# Altium footprint library RXM-433-LR.PcbLib: 1 footprints
Each footprint in its own frame and in the unit in brackets; x right, y up, seen from the top. Pads: shape width x height; smd on the part's side, far side on the other; paste and mask are expansions set on the pad; w line width, h text height; cw(c..) or ccw(c..) is an arc to the next point about the centre after c.
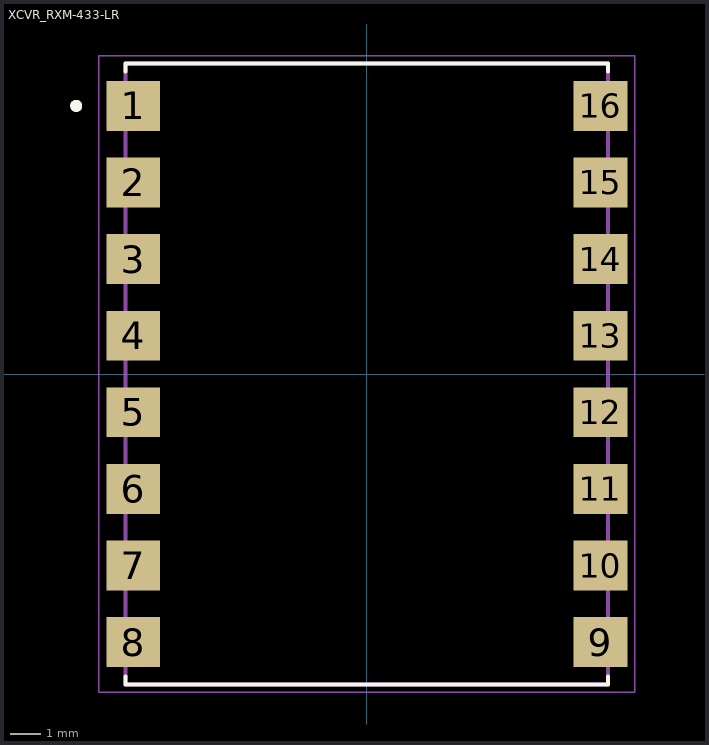
[diagram p0: the footprint, top view; thin cyan lines are the x and y axes]

## XCVR_RXM-433-LR [mil]
height 122.83
pads (16):
  rect 70x65 smd: 1(-305,350) 2(-305,250) 3(-305,150) 4(-305,50) 5(-305,-50) 6(-305,-150) 7(-305,-250) 8(-305,-350) 9(305,-350) 10(305,-250) 11(305,-150) 12(305,-50) 13(305,50) 14(305,150) 15(305,250) 16(305,350)
Top Overlay:
  circle w7.87: c-379.37,350 r3.94
  lines w5: -314.96,-395.1 -314.96,-405.51 314.96,-405.51 314.96,-395.1 ; -314.96,395.1 -314.96,405.51 314.96,405.51 314.96,395.1
Mechanical 13:
  circle w7.87: c-379.37,350 r3.94
  lines w5: -314.96,-405.51 -314.96,405.51 314.96,405.51 314.96,-405.51 -314.96,-405.51
Mechanical 15:
  lines w1.97: -349.84,-415.35 349.84,-415.35 349.84,415.35 -349.84,415.35 -349.84,-415.35